# Altium schematic symbol library Headers.SchLib: 126 symbols (part 1 of 2)
Pins are listed as number, name and electrical type; pins without a type are passive.

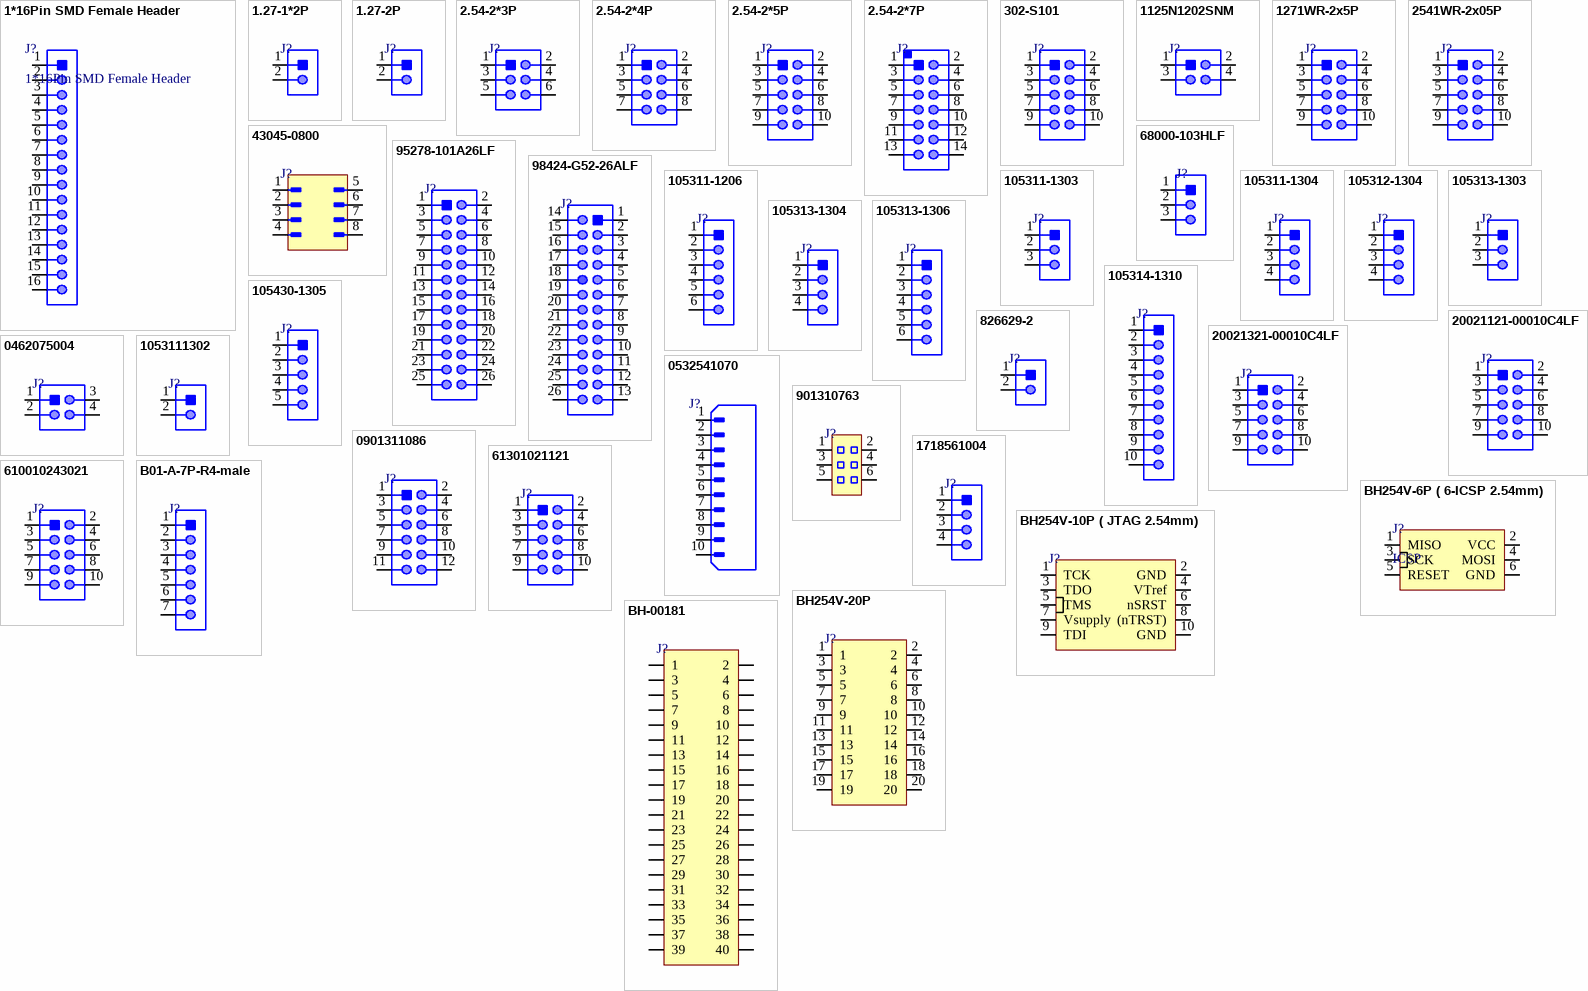
[diagram p0: symbols 1*16Pin SMD Female Header to BH-00181]

## 1*16Pin SMD Female Header
designator J?
Manufacturer: E-SIMPO; Manufacturer Part no:: SMT female header; Package: SMD; Item Type: Header; ComponentLink1Description: Aliexpress; ComponentLink1URL: https://aliexpress.us/item/2255800743267642.html?spm=a2g0o.detail.1000023.4.310a8hpZ8hpZEX&gatewayAdapt=glo2usa4itemAdapt
footprint 1*16Pin SMD Female Header
pins: 1, 2, 3, 4, 5, 6, 7, 8, 9, 10, 11, 12, 13, 14, 15, 16

## 1.27-1*2P
designator J?
3A Direct Insert Policy 1.7mm 2P 3mm -55℃~+105℃ 2.5mm 1.27mm Single Row Black Brass 1x2P Plugin,P=1.27mm Pin Headers ROHS; Manufacturer: BOOMELE(BOOM Precision Elec); Manufacturer Part Number: 1.27-1*2P; Item Type: Male; Package: Plugin,P=1.27mm; LCSC Part Number: C703015; ComponentLink1Description: LCSC; ComponentLink1URL: https://www.lcsc.com/product-detail/Pin-Headers_BOOMELE-Boom-Precision-Elec-1-27-1-2P_C703015.html
footprint HDR 1x2 Male 1.27mm
pins: 1, 2

## 1.27-2P
designator J?
250V 1A Right-Angle Square Pins 2P -25℃~+85℃ 1.27mm Plugin Black 1x2P Push-Pull,P=1.27mm Pin Headers ROHS; Manufacturer: BOOMELE; Manufacturer Part Number: 1.27-2P; Package: Push-Pull,P=1.27mm; LCSC Part Number: C48999; Item Type: Headers; ComponentLink1Description: LCSC; ComponentLink1URL: https://jlcpcb.com/partdetail/boomele_boom_Precision_elec-1_272P/C48999
footprint HDR1X2 (R/A Male) 1.27mm Pitch
pins: 1, 2

## 2.54-2*3P
designator J?
Straight 6P 2.54mm 双排 Black Plugin,P=2.54mm Pin Headers ROHS; Manufacturer: BOOMELE(BOOM Precision Elec); Manufacturer Part Number: 2.54-2*3P; Item Type: Male; Package: SMD,P=2.54mm; LCSC Part Number: C65114; ComponentLink1Description: LCSC; ComponentLink1URL: https://www.lcsc.com/product-detail/Pin-Headers_BOOMELE-Boom-Precision-Elec-2-54-2-3P_C65114.html
footprint 2.54-2*3P
pins: 1, 2, 3, 4, 5, 6

## 2.54-2*4P
designator J?
3A Brick nogging Square Pins 2.5mm 8P 6mm -55℃~+105℃ 2.54mm 双排 Black 2x4P 2.54mm SMD,P=2.54mm Pin Headers ROHS; Manufacturer: BOOMELE(BOOM Precision Elec); Manufacturer Part Number: 2.54-2*4P; Item Type: Male; Package: SMD,P=2.54mm; LCSC Part Number: C192300; ComponentLink1Description: LCSC; ComponentLink1URL: https://www.lcsc.com/product-detail/Pin-Headers_BOOMELE-Boom-Precision-Elec-C192300_C192300.html
footprint C192300
pins: 1, 2, 3, 4, 5, 6, 7, 8

## 2.54-2*5P
designator J?
2.54mm 2.54mm 双排 Gold 2.5A 10P Brass -55℃~+105℃ 220℃@10S Brick nogging 2x5P 8.5mm Top Square Holes SMD,P=2.54mm Female Headers ROHS; Manufacturer: BOOMELE(BOOM Precision Elec); Manufacturer Part Number: 2.54-2*5P; Item Type: Male; Package: SMD,P=2.54mm; LCSC Part Number: C843271; ComponentLink1Description: LCSC; ComponentLink1URL: https://www.lcsc.com/product-detail/Female-Headers_BOOMELE-Boom-Precision-Elec-2-54-2-5P_C843271.html
footprint C843271
pins: 1, 2, 3, 4, 5, 6, 7, 8, 9, 10

## 2.54-2*7P
designator J?
2.54mm Straight 2x7P 7 Horn buckle 2.54mm 2 Plugin,P=2.54mm IDC Connectors ROHS; Manufacturer: BOOMELE; Manufacturer Part Number: 2.54-2*7P; Package: Plugin,P=2.54mm; LCSC Part Number: C9037; Item Type: IDC Connectors; ComponentLink1Description: LCSC; ComponentLink1URL: https://www.lcsc.com/product-detail/IDC-Connectors_BOOMELE-Boom-Precision-Elec-2-54-2-7P_C9037.html
footprint 2.54-2*7P
pins: 1, 2, 3, 4, 5, 6, 7, 8, 9, 10, 11, 12, 13, 14

## 302-S101
designator J?
CONN HEADER VERT 10POS 2.54MM; Manufacturer: On-Shore Technology; Manufacturer Part Number: 302-S101; Number of Positions: 10; Connector Type: Male Pin; Pitch: 0.1inch; Item Type: Shrouded Header; Supplier 1: Digi-Key; Stock 1: 23093; Pricing 1: 1=0.28, 10=0.265, 100=0.1856, 500=0.15908, 1000=0.13256, 5000=0.11362, 10000=0.10605 (USD); Mount: Through Hole; Color: Black; Contact Plating: Gold; Number of Rows: 2; Packaging: Tray; Termination: Solder; Series: 302; Contact Type: Male Pin; Row Spacing: 0.1inch; ComponentLink1URL: http://www.on-shore.com/wp-content/uploads/2018/04/302-SXX1.pdf?src-supplier=Digi-Key; ComponentLink1Description: http://www.on-shore.com/wp-content/uploads/2018/04/302-SXX1.pdf?src-supplier=Digi-Key; Supplier Part Number 1: ED1543-ND
footprint 302-S101_
pins: 1, 2, 3, 4, 5, 6, 7, 8, 9, 10

## 1125N1202SNM
designator J?
CONN HEADER 4 POS 2.54mm SMD; Manufacturer: RTLECS; Manufacturer Part Number: 1125N1202SNM; Connector type: Pin header Male SMT; Pitch: 2.54; Current rating: 3 A; Item Type: Header; ComponentLink1Description: LCSC; ComponentLink1URL: https://m.id.aliexpress.com/i/32727363517.html
footprint 1125N1202SNM. (CONN HEADER 4 POS 2.54mm SMD)
pins: 1, 2, 3, 4

## 1271WR-2x5P
designator J?
Gold Right-Angle Square Pins 2mm 3mm 10P -40℃~+105℃ 1.27mm Double row 2x5P Push-Pull,P=1.27mm Pin Headers ROHS; Manufacturer: HanElectricity; Manufacturer Part Number: 1271WR-2x5P; Item Type: Header; Package: Push-Pull,P=1.27mm; LCSC Part Number: C7470108; ComponentLink1Description: LCSC; ComponentLink1URL: https://jlcpcb.com/partdetail/Hanelectricity-1271WR2x5P/C7470108
footprint HDR 2x5TH (rigth angle) 1.27mm Pitch
pins: 1, 2, 3, 4, 5, 6, 7, 8, 9, 10

## 2541WR-2x05P
designator J?
Right-Angle 2.5mm 6mm 10P 2.54mm 双排 2x5P Plugin,P=2.54mm Pin Headers ROHS; Manufacturer: HanElectricity; Manufacturer Part Number: 2541WR-2x05P; Package: Plugin,P=2.54mm; LCSC Part Number: C5383090; Item Type: Pin Header; ComponentLink1Description: LCSC; ComponentLink1URL: https://www.lcsc.com/product-detail/Pin-Headers_HanElectricity-2541WR-2x05P_C5383090.html
footprint HDR 2x5TH (rigth angle)
pins: 1, 2, 3, 4, 5, 6, 7, 8, 9, 10

## 43045-0800
designator J?
CONN HEADER R/A 8POS 3MM; Manufacturer: Molex; Manufacturer Part Number: 43045-0800; Item Type: Headers and Wire Housings; Plating: Tin; Contact Resistance: 10mR; Max Voltage Rating (DC): 250.25kV; Current Rating: 5A; Number of Poles: 8; Voltage Rating (AC): 250V; Voltage Rating: 600V; Gender: Male; Approvals: UL,CSA,TUV; Glow Wire Compliant: Compliant; Supplier: Arrow Electronics; Supplier Part Number: 43045-0800; RoHS: Yes; Stock: 99682; Pricing: 1=0.8079, 10=0.7846, 100=0.7589, 500=0.7388, 1440=0.7241, 5760=0.7046 (USD); Mounting Technology: Through Hole; Case/Package: SMC; Contact Plating: Tin; Contact Material: Brass,Tin; Color: Black; Material: Polyester; Housing Color: Black; Housing Material: Thermoplastic; Min Operating Temperature: -40°C; Max Operating Temperature: 105°C; Number of Rows: 2; Package Quantity: 1440; Packaging: Tray; Max Current Rating: 5A; Number of Positions: 8; Termination: Solder; Number of Contacts: 8; Number of Circuits: 8; Working Voltage: 250V; Orientation: Right Angle; Voltage Rating (DC): 250V; Series: 43045; Diameter: 3mm; Length: 16.15mm; Height: 8.77mm; Pitch: 3mm; Row Spacing: 3mm; Depth: 12.2mm; Radiation Hardening: No; Halogen Free: Low Halogen; Lead Free: Lead Free; Flammability Rating: UL94 V-0; RoHS Compliant: Yes; Reach SVHC Compliant: Unknown; ComponentLink1URL: https://datasheet.ciiva.com/11751/0900766b80027348-11751142.pdf?src-supplier=Rs; ComponentLink1Description: https://datasheet.ciiva.com/11751/0900766b80027348-11751142.pdf?src-supplier=Rs; ComponentLink2URL: https://datasheet.ciiva.com/14155/04402310-14155206.pdf?src-supplier=Distrelec; ComponentLink2Description: https://datasheet.ciiva.com/14155/04402310-14155206.pdf?src-supplier=Distrelec; ComponentLink3URL: https://datasheet.ciiva.com/1443/1850016-1443537.pdf?src-supplier=Element14; ComponentLink3Description: https://datasheet.ciiva.com/1443/1850016-1443537.pdf?src-supplier=Element14
footprint 0430450800
pins: 1, 2, 3, 4, 5, 6, 7, 8

## 68000-103HLF
designator J?
CONN HEADER VERT 3POS 2.54MM; Manufacturer Part Number: 68000-103HLF; Item Type: Male Header; Number of Positions: 3; Current Rating: 3A; Insulation Resistance: 5GR; Voltage Rating: 1.5kV; Contact Post Length: 2.41mm; LCSC Part Number: C168677; Supplier: Avnet; Supplier Part Number: 88K1775; RoHS: No; Category: Headers and Wire Housings; Stock: 2805; Pricing: 1=0.395, 10=0.31, 25=0.29, 50=0.27, 100=0.25 (USD); Contact Plating: Gold,GXT; Contact Material: Bronze; Housing Material: Thermoplastic; Housing Color: Black; Min Operating Temperature: -65°C; Max Operating Temperature: 125°C; Number of Rows: 1; Termination: Through Hole; Packaging: Bulk; Number of Contacts: 3; Contact Gender: Male; Orientation: Straight; Max Voltage Rating (AC): 1.5kV; Package Quantity: 100; Series: 68000; Length: 7.62mm; Pitch: 2.54mm; Contact Mating Length: 5.84mm; Depth: 2.41mm; Radiation Hardening: No; Flammability Rating: UL94 V-0; Reach SVHC Compliant: No; ComponentLink2URL: https://datasheet.ciiva.com/46392/1914865-46392021.pdf?src-supplier=Element14; ComponentLink2Description: https://datasheet.ciiva.com/46392/1914865-46392021.pdf?src-supplier=Element14
footprint HDR1X3_ (Connector; Header; 3 Position)
pins: 1, 2, 3

## 95278-101A26LF
designator J?
CONN HEADER SMD 26POS 2.54MM; Manufacturer: Amphenol ICC (FCI); Manufacturer Part Number: 95278-101A26LF; Item Type: Male Header; Package: Custom; ComponentLink1Description: New link; ComponentLink1URL: https://www.digikey.com/en/products/detail/amphenol-icc-fci/95278-101A26LF/1488594; LCSC Part Number: C60131
footprint 95278-101A26LF. (CONN HEADER SMD 26POS 2.54MM)
pins: 1, 2, 3, 4, 5, 6, 7, 8, 9, 10, 11, 12, 13, 14, 15, 16, 17, 18, 19, 20, 21, 22, 23, 24, 25, 26

## 98424-G52-26ALF
designator J?
CONN HEADER SMD 26POS 2MM; Manufacturer: Amphenol ICC / FCI; Manufacturer Part Number: 98424-G52-26ALF; Item Type: Headers and Wire Housings; Supplier: Avnet; Supplier Part Number: 65AC3204; RoHS: Yes; Stock: 29; Pricing: 1=1.91 (USD); ComponentLink1URL: https://datasheet.ciiva.com/713/98424-713391.pdf?src-supplier=Digikey; ComponentLink1Description: https://datasheet.ciiva.com/713/98424-713391.pdf?src-supplier=Digikey; ComponentLink2URL: https://datasheet.ciiva.com/713/98424-713392.pdf?src-supplier=Digikey; ComponentLink2Description: https://datasheet.ciiva.com/713/98424-713392.pdf?src-supplier=Digikey; ComponentLink3URL: https://datasheet.ciiva.com/9473/98424-9473029.pdf?src-supplier=Avnet; ComponentLink3Description: https://datasheet.ciiva.com/9473/98424-9473029.pdf?src-supplier=Avnet; ComponentLink4URL: https://datasheet.ciiva.com/729/98424-729327.pdf?src-supplier=Digikey; ComponentLink4Description: https://datasheet.ciiva.com/729/98424-729327.pdf?src-supplier=Digikey; LCSC Part Number: C213188
footprint 98424-G52-26ALF
pins: 1, 2, 3, 4, 5, 6, 7, 8, 9, 10, 11, 12, 13, 14, 15, 16, 17, 18, 19, 20, 21, 22, 23, 24, 25, 26

## 105311-1206
designator J?
CONN HEADER VERT 6POS 2.5MM; Manufacturer: Molex; Manufacturer Part Number: 105311-1206; Supplier: Mouser; Supplier Part Number: 538-105311-1206; RoHS: No; Item Type: Header; Stock: 291; Pricing: 1=2.1, 10=1.48, 50=1.48, 100=1.48, 1000=1.17, 10000=1.17 (USD); ComponentLink1URL: https://www.molex.com/pdm_docs/sd/1053111102_sd.pdf?src-supplier=Digikey; ComponentLink1Description: https://www.molex.com/pdm_docs/sd/1053111102_sd.pdf?src-supplier=Digikey
footprint 1053111206
pins: 1, 2, 3, 4, 5, 6

## 105311-1303
designator J?
CONN HEADER VERT 3POS 2.5MM; Manufacturer: Molex; Manufacturer Part Number: 105311-1303; Number of Positions: 3; Voltage Rating: 250V; Supplier: Mouser; Supplier Part Number: 538-105311-1303; RoHS: No; Item Type: Header; Stock: 668; Pricing: 1=1.61, 10=1.35, 50=1.35, 100=1.12, 1000=0.918, 10000=0.796 (USD); Mounting Technology: Through Hole; Contact Material: Brass; Contact Shape: Square; Insulation Material: Polymer; Insulation Color: Black; Contact Finish - Mating: GOLD; Min Operating Temperature: -40°C; Max Operating Temperature: 105°C; Number of Rows: 1; Connector Type: Header; Fastening Type: Latch; Packaging: Tray; Termination: Solder; Series: Nano-Fit 105311; Contact Type: Male Pin; ComponentLink1URL: https://www.molex.com/pdm_docs/sd/1053111102_sd.pdf?src-supplier=Digikey; ComponentLink1Description: https://www.molex.com/pdm_docs/sd/1053111102_sd.pdf?src-supplier=Digikey
footprint 1053111303
pins: 1, 2, 3

## 105311-1304
designator J?
CONN HEADER VERT 4POS 2.5MM; Manufacturer: Molex; Manufacturer Part Number: 105311-1304; Supplier 1: Digikey; RoHS: No; Item Type: Header; Stock 1: 2407; Pricing 1: 1=1.89, 10=1.612, 126=1.33143, 1008=1.05111, 4914=0.93198, 10080=0.91096 (USD); ComponentLink1URL: https://www.molex.com/pdm_docs/sd/1053111102_sd.pdf?src-supplier=Digikey; ComponentLink1Description: https://www.molex.com/pdm_docs/sd/1053111102_sd.pdf?src-supplier=Digikey; Supplier Part Number 1: WM15091-ND; LCSC Part Number: C17483525
footprint 1053111304
pins: 1, 2, 3, 4

## 105312-1304
designator J?
CONN HEADER VERT 4POS 2.5MM; Manufacturer: Molex; Manufacturer Part Number: 105312-1304; Supplier: Mouser; Supplier Part Number: 538-105312-1304; RoHS: No; Item Type: Header; Stock: 2910; Pricing: 1=1.24, 10=1.06, 50=1.06, 100=0.921, 1000=0.865, 10000=0.865 (USD); ComponentLink1URL: https://www.molex.com/pdm_docs/sd/1053121204_sd.pdf?src-supplier=Digikey; ComponentLink1Description: https://www.molex.com/pdm_docs/sd/1053121204_sd.pdf?src-supplier=Digikey
footprint 105312-1304
pins: 1, 2, 3, 4

## 105313-1303
designator J?
CONN HEADER R/A 3POS 2.5MM; Manufacturer: Molex; Manufacturer Part Number: 105313-1303; Number of Positions: 3; Voltage Rating: 250V; Supplier: Mouser; Supplier Part Number: 538-105313-1303; RoHS: Yes; Item Type: Header; Stock: 1725; Pricing: 1=1.27, 10=1.08, 50=1.08, 100=0.945, 1000=0.945, 10000=0.945 (USD); Mounting Technology: Through Hole; Contact Material: Brass; Contact Shape: Square; Insulation Material: Polymer; Insulation Color: Black; Contact Finish - Mating: GOLD; Min Operating Temperature: -40°C; Max Operating Temperature: 105°C; Number of Rows: 1; Connector Type: Header; Fastening Type: Latch; Packaging: Tray; Termination: Solder; Series: Nano-Fit 105313; Contact Type: Male Pin; RoHS Compliant: Yes; ComponentLink1URL: https://www.molex.com/pdm_docs/sd/1053131102_sd.pdf?src-supplier=Digikey; ComponentLink1Description: https://www.molex.com/pdm_docs/sd/1053131102_sd.pdf?src-supplier=Digikey
footprint 1053131303
pins: 1, 2, 3

## 105313-1304
designator J?
CONN HEADER R/A 4POS 2.5MM; Manufacturer: Molex; Manufacturer Part Number: 105313-1304; Plating: 154ConductorMaterial; Number of Positions: 4; Voltage Rating: 250V; Current Rating: 8A; Number of Circuits: 4NUMBER; Supplier: Mouser; Supplier Part Number: 538-105313-1304; RoHS: Yes; Item Type: Header; Stock: 4079; Pricing: 1=1.61, 10=1.45, 50=1.45, 100=1.26, 1000=1.11, 10000=1.11 (USD); Mounting Technology: Through Hole; Contact Material: Brass; Contact Shape: Square; Insulation Material: Polymer; Insulation Color: Black; Contact Finish - Mating: GOLD; Min Operating Temperature: -40°C; Max Operating Temperature: 105°C; Connector Type: Header; Fastening Type: Latch; Packaging: Tray; Number of Rows: 1; Termination: Solder; Series: Nano-Fit 105313; Contact Type: Male Pin; Number of Contacts: 4NUMBER; Orientation: 5492OrientationType; Height: 6.84mm; RoHS Compliant: Yes; ComponentLink1URL: http://www.farnell.com/datasheets/2788568.pdf?src-supplier=Farnell; ComponentLink1Description: http://www.farnell.com/datasheets/2788568.pdf?src-supplier=Farnell; ComponentLink2URL: http://www.farnell.com/datasheets/2788568.pdf?src-supplier=Newark; ComponentLink2Description: http://www.farnell.com/datasheets/2788568.pdf?src-supplier=Newark; ComponentLink3URL: https://www.molex.com/pdm_docs/sd/1053131102_sd.pdf?src-supplier=Digikey; ComponentLink3Description: https://www.molex.com/pdm_docs/sd/1053131102_sd.pdf?src-supplier=Digikey
footprint 1053131304
pins: 1, 2, 3, 4

## 105313-1306
designator J?
CONN HEADER R/A 6POS 2.5MM; Manufacturer: Molex; Manufacturer Part Number: 105313-1306; Supplier: Mouser; Supplier Part Number: 538-105313-1306; RoHS: Yes; Item Type: Header; Stock: 1427; Pricing: 1=2.09, 10=1.9, 50=1.9, 100=1.65, 1000=1.48, 10000=1.39 (USD); ComponentLink1URL: https://www.molex.com/pdm_docs/sd/1053131102_sd.pdf?src-supplier=Digikey; ComponentLink1Description: https://www.molex.com/pdm_docs/sd/1053131102_sd.pdf?src-supplier=Digikey
footprint 1053131306
pins: 1, 2, 3, 4, 5, 6

## 105314-1310
designator J?
CONN HEADER R/A 10POS 2.5MM; Manufacturer: Molex; Manufacturer Part Number: 105314-1310; Item Type: Headers; Number of Positions: 10; Supplier: Mouser; Supplier Part Number: 538-105314-1310; RoHS: Yes; Stock: 1648; Pricing: 1=2.66, 10=2.31, 50=2.31, 100=2.15, 1000=2.15, 10000=1.95 (USD); Mounting Technology: Through Hole; Contact Material: Brass; Contact Shape: Square; Insulation Material: Polymer; Insulation Color: Black; Contact Finish - Mating: GOLD; Min Operating Temperature: -40°C; Max Operating Temperature: 105°C; Connector Type: Header; Fastening Type: Latch; Packaging: Tray; Number of Rows: 2; Termination: Solder; Series: Nano-Fit 105314; Contact Type: Male Pin; RoHS Compliant: Yes; ComponentLink1URL: https://www.molex.com/pdm_docs/sd/1053141104_sd.pdf?src-supplier=Digikey; ComponentLink1Description: https://www.molex.com/pdm_docs/sd/1053141104_sd.pdf?src-supplier=Digikey; ComponentLink2URL: http://www.farnell.com/datasheets/2788570.pdf?src-supplier=Newark; ComponentLink2Description: http://www.farnell.com/datasheets/2788570.pdf?src-supplier=Newark
footprint 1053141310
pins: 1, 2, 3, 4, 5, 6, 7, 8, 9, 10

## 105430-1305
designator J?
NANO-FIT HDR SMT RA SGL 5CKT 30A; Manufacturer: Molex; Manufacturer Part Number: 105430-1305; Item Type: Header; Supplier: Mouser; Supplier Part Number: 538-105430-1305; RoHS: No; Stock: 818; Pricing: 1=3.62, 10=3.19, 50=3.19, 100=2.54, 1000=2.19, 10000=2.15 (USD)
footprint 1054301305
pins: 1, 2, 3, 4, 5

## 826629-2
designator J?
CONN HEADER VERT 2POS 2.54MM; Manufacturer: TE Connectivity; Manufacturer Part Number: 8266292; Number of Contacts: 2; Connector Type: Plug,Header,Pin; Current Rating: 3A; Board Standoff: No (Without); High Speed Serial Data Connector: No; PCB Mount Retention: Without; Gender: Male; PCB Mounting Orientation: Vertical; Contact Post Length: 0.1259inch; Plating Thickness: 0.8um; Item Type: Male Header; Supplier 1: RSComponents; RoHS: Yes; Category: Board to Board Connectors; Mount: Straddle Mount; Contact Plating: Gold,Tin; Contact Material: Bronze; Color: Green; Housing Color: Green; Housing Material: PBT; Contact Shape: Square; Min Operating Temperature: -65°C; Max Operating Temperature: 105°C; Number of Rows: 1; Termination: Through Hole; Number of Positions: 2; Packaging: Carton; Package Quantity: 3000; Series: AMPMODU MOD II; Contact Type: Male Pin; Contact Gender: Male; Orientation: Straight; Contact Protection: No (Without); Gasket: No (Without); High Temperature Housing: No; Keyed: No; Mating Alignment: No (Without); Mating Connector Lock: No (Without); Selectively Loaded: No (Without); Stabilizers: No (Without); Strain Relief: No (Without); Length: 5.08mm; Pitch: 2.54mm; Contact Mating Length: 6.7mm; Row Spacing: 2.54mm; Depth: 2.5mm; Radiation Hardening: No; Flammability Rating: UL94 V-0; REACH SVHC: No SVHC; ELV: Compliant; Lead Free: Lead Free; ComponentLink1URL: https://datasheet.ciiva.com/11746/0900766b80d7c358-11746248.pdf?src-supplier=RSComponents; ComponentLink1Description: https://datasheet.ciiva.com/11746/0900766b80d7c358-11746248.pdf?src-supplier=RSComponents; ComponentLink2URL: https://datasheet.ciiva.com/30224/8266292-30224019.pdf?src-supplier=Onlinecomponents.com; ComponentLink2Description: https://datasheet.ciiva.com/30224/8266292-30224019.pdf?src-supplier=Onlinecomponents.com; ComponentLink3URL: https://datasheet.ciiva.com/29369/001094754-da-01-en-stiftleiste-1-reihig-0-0826629-2-29369600.pdf?src-supplier=Conrad; ComponentLink3Description: https://datasheet.ciiva.com/29369/001094754-da-01-en-stiftleiste-1-reihig-0-0826629-2-29369600.pdf?src-supplier=Conrad; ComponentLink4URL: https://datasheet.ciiva.com/6857/eng-cd-826629-aa-basefilename-6857135.pdf?src-supplier=Digi-Key; ComponentLink4Description: https://datasheet.ciiva.com/6857/eng-cd-826629-aa-basefilename-6857135.pdf?src-supplier=Digi-Key; ComponentLink5URL: https://datasheet.ciiva.com/14120/eh826629-draw-14120837.pdf?src-supplier=Distrelec; ComponentLink5Description: https://datasheet.ciiva.com/14120/eh826629-draw-14120837.pdf?src-supplier=Distrelec; Supplier Part Number 1: 1361864; LCSC Part Number: C86471
footprint HDR1X2_ (CONN HEADER VERT 2POS 2.54MM)
pins: 1, 2

## 20021121-00010C4LF
designator J?
CONN HEADER SMD 10POS 1.27MM; Manufacturer: Amphenol FCI; Manufacturer Part Number: 20021121-00010C4LF; Number of Contacts: 10; Contact Resistance: 30mR; Current Rating: 1A; Voltage Rating: 125V; Insulation Resistance: 100MR; Gender: Male; Connector Type: Male Pin,Header; Row Spacing: 0.05inch; Stack Height: 3mm; Item Type: Jtag Male Header; Supplier 1: Digi-Key; Stock 1: 0; Pricing 1: 1=0.87, 10=0.761, 100=0.6563 (USD); Mount: Surface Mount; Contact Plating: Gold; Contact Material: Copper Alloy,Copper,Gold; Color: Black; Housing Color: Black; Housing Material: Thermoplastic; Min Operating Temperature: -40°C; Max Operating Temperature: 85°C; Number of Rows: 2; Termination: Solder; Packaging: Tape and Reel; Package Quantity: 600; Number of Positions: 10; Max Voltage Rating (AC): 125V; Orientation: Straight; Length: 6.35mm; Pitch: 1.27mm; Contact Mating Length: 0.12inch; Depth: 3.4mm; Radiation Hardening: No; REACH SVHC: No SVHC; ComponentLink1URL: https://www.verical.com/server-webapp/html/getDatasheet?partID=177140&src-supplier=Verical; ComponentLink1Description: https://www.verical.com/server-webapp/html/getDatasheet?partID=177140&src-supplier=Verical; ComponentLink2URL: http://portal.fciconnect.com/Comergent/fci/drawing/20021121.pdf?src-supplier=Avnet; ComponentLink2Description: http://portal.fciconnect.com/Comergent/fci/drawing/20021121.pdf?src-supplier=Avnet; ComponentLink3URL: https://cdn.amphenol-icc.com/media/wysiwyg/files/drawing/20021121.pdf?src-supplier=Digi-Key; ComponentLink3Description: https://cdn.amphenol-icc.com/media/wysiwyg/files/drawing/20021121.pdf?src-supplier=Digi-Key; ComponentLink4URL: http://portal.fciconnect.com/Comergent/fci/drawing/20021121.pdf?src-supplier=Avnet+Europe; ComponentLink4Description: http://portal.fciconnect.com/Comergent/fci/drawing/20021121.pdf?src-supplier=Avnet+Europe; ComponentLink5URL: https://media.digikey.com/pdf/Data%20Sheets/FCI%20PDFs/Minitek%20127_Catalog.pdf?src-supplier=Digi-Key; ComponentLink5Description: https://media.digikey.com/pdf/Data%20Sheets/FCI%20PDFs/Minitek%20127_Catalog.pdf?src-supplier=Digi-Key; ComponentLink6URL: http://portal.fciconnect.com/Comergent//fci/drawing/20021121.pdf?src-supplier=Mouser; ComponentLink6Description: http://portal.fciconnect.com/Comergent//fci/drawing/20021121.pdf?src-supplier=Mouser; Supplier Part Number 1: 609-3695-6-ND; LCSC Part Number: C150517
footprint 20021121-00010C4LF_
pins: 1, 2, 3, 4, 5, 6, 7, 8, 9, 10

## 20021321-00010C4LF
designator J?
CONN RCPT 10POS 0.05 GOLD SMD; Manufacturer: Amphenol Communications Solutions; Manufacturer Part Number: 20021321-00010C4LF; Item Type: Headers and Wire Housings; Gender: 4472Gender; Connector Type: 4640ConnectorType; Current Rating: 1A; Number of Contacts: 10NUMBER; Voltage Rating: 125V; Contact Resistance: 30mR; Insulation Resistance: 100MR; Pitch: 1.27mm; Stack Height: 4.3mm; Supplier: Digikey; LCSC Part Number: C598542; RoHS: No; Stock: 9747; Pricing: 1=1.13, 10=0.963, 100=0.8184 (USD); Mounting Technology: 8Mount; Pins: 10NUMBER; Color: 46Colour; Contact Material: 153,157ConductorMaterial; Contact Plating: 157ConductorMaterial; Housing Color: 46Colour; Housing Material: 4896ConductorMaterial; Min Operating Temperature: -55°C; Max Operating Temperature: 125°C; Number of Positions: 10NUMBER; Number of Rows: 2NUMBER; Packaging: 10Packaging; Termination: 4558ConnectorType; Max Voltage Rating (AC): 125V; Length: 13.16mm; Height: 4.75mm; Depth: 3mm; Row Spacing: 1.27mm; Lead Free: 5697LeadFree; Reach SVHC Compliant: 4186SVHC; ComponentLink1URL: https://datasheet.octopart.com/20021321-00010C4LF-FCI-datasheet-27119701.pdf?src-supplier=Newark; ComponentLink1Description: https://datasheet.octopart.com/20021321-00010C4LF-FCI-datasheet-27119701.pdf?src-supplier=Newark; ComponentLink2URL: https://datasheet.octopart.com/20021321-00010C4LF-Amphenol-Communications-Solutions-datasheet-98396828.pdf?src-supplier=Element14; ComponentLink2Description: https://datasheet.octopart.com/20021321-00010C4LF-Amphenol-Communications-Solutions-datasheet-98396828.pdf?src-supplier=Element14; ComponentLink3URL: https://datasheet.octopart.com/20021321-00010C4LF-FCI-datasheet-21379677.pdf?src-supplier=Farnell; ComponentLink3Description: https://datasheet.octopart.com/20021321-00010C4LF-FCI-datasheet-21379677.pdf?src-supplier=Farnell; ComponentLink4URL: https://datasheet.octopart.com/20021321-00010C4LF-Amphenol-Communications-Solutions-datasheet-100449241.pdf?src-supplier=TME; ComponentLink4Description: https://datasheet.octopart.com/20021321-00010C4LF-Amphenol-Communications-Solutions-datasheet-100449241.pdf?src-supplier=TME
footprint 20021321-00010C4LF
pins: 1, 2, 3, 4, 5, 6, 7, 8, 9, 10

## 0462075004
designator J?
MINI-FIT JR LCP VERT. HDR PEGS 4; Manufacturer: Molex; Manufacturer Part Number: 0462075004; Item Type: Header; Supplier: Digikey; Supplier Part Number: 900-0462075004-ND; RoHS: No; Pricing: 4560=4.03702 (USD)
footprint 0462075004
pins: 1, 2, 3, 4

## 0532541070
designator J?
CONN HEADER R/A 10POS 2MM; Manufacturer: Molex; Manufacturer Part Number: 53254-1070; Item Type: Headers and Wire Housings; Plating: Tin; Voltage Rating: 125V; Current Rating: 2A; Number of Positions: 10; Gender: Male; Number of Circuits: 9; Glow Wire Compliant: Non-compliant; Supplier: Arrow Electronics; Supplier Part Number: 53254-1070; RoHS: Yes; Stock: 4800; Pricing: 4800=0.2383, 6000=0.2327, 10000=0.2292, 20000=0.2263, 30000=0.2219, 50000=0.2176, 100000=0.2136 (USD); Mounting Technology: Through Hole; Contact Plating: Tin; Contact Material: Brass; Housing Material: Nylon; Min Operating Temperature: -40°C; Max Operating Temperature: 105°C; Number of Rows: 1; Packaging: Tray; Contact Gender: Male; Termination: Through Hole; Number of Contacts: 10; Orientation: Right Angle; Series: 53254; Pitch: 2mm; RoHS Compliant: Yes; Reach SVHC Compliant: Unknown; ComponentLink1URL: https://datasheet.ciiva.com/7810/0532541070-pcb-headers-7810534.pdf?src-supplier=Element14; ComponentLink1Description: https://datasheet.ciiva.com/7810/0532541070-pcb-headers-7810534.pdf?src-supplier=Element14
footprint 0532541070
pins: 1, 2, 3, 4, 5, 6, 7, 8, 9, 10

## 901310763
designator J?
CONN HEADER VERT 6POS 2.54MM; Manufacturer: Molex; Manufacturer Part Number: 90131-0763; Item Type: Headers and Wire Housings; Plating: Tin; Voltage Rating (AC): 350V; Number of Contacts: 6; Contact Resistance: 20mR; Current Rating: 3A; Insulation Resistance: 5GR; Gender: Male; Supplier: Mouser; LCSC Part Number: C588698; RoHS: Yes; Stock: 5067; Pricing: 1=1.26, 10=0.992, 50=0.992, 100=0.947, 1000=0.855, 10000=0.827 (USD); Mounting Technology: Through Hole; Contact Plating: Gold,Tin; Contact Material: Brass; Material: Glass,Polyester; Housing Color: Black; Housing Material: Polyester; Min Operating Temperature: -55°C; Max Operating Temperature: 125°C; Termination: Through Hole; Number of Rows: 2; Voltage Rating: 350V; Packaging: Tray; Package Quantity: 2400; Series: C-Grid III; Voltage Rating (DC): 350V; Number of Poles: 6; Number of Positions: 6; Working Voltage: 350V; Orientation: Straight; Number of Circuits: 6; Pitch: 2.54mm; Lead Pitch: 2.54mm; Radiation Hardening: No; Lead Free: Lead Free; RoHS Compliant: Yes; Reach SVHC Compliant: Unknown; ComponentLink1URL: https://datasheet.ciiva.com/11746/0900766b81280103-11746132.pdf?src-supplier=Rs; ComponentLink1Description: https://datasheet.ciiva.com/11746/0900766b81280103-11746132.pdf?src-supplier=Rs; ComponentLink2URL: https://datasheet.ciiva.com/5156/0901310763-pcb-headers-151716-5156767.pdf?src-supplier=Mouser; ComponentLink2Description: https://datasheet.ciiva.com/5156/0901310763-pcb-headers-151716-5156767.pdf?src-supplier=Mouser
footprint 2.54-2*3P
pins: 1, 2, 3, 4, 5, 6

## 0901311086
designator J?
2.54mm Pitch C-Grid III Header, Dual Row, Vertical, 12 Circuits, 0.10µm Gold (Au) Selective Plating; Manufacturer: Molex; Manufacturer Part Number: 0901311086; Number of Positions: 12; Pitch: 0.1inch; Item Type: Header; Supplier: Digikey; Supplier Part Number: WM20588-ND; RoHS: Yes; Category: Uncategorized; Stock: 1766; Pricing: 1=1.44, 10=1.224, 80=1.01075, 1200=0.79795, 6000=0.70752, 10800=0.69156 (USD); Mounting Technology: Through Hole; Color: Black; Contact Plating: Gold; Contact Material: Brass; Contact Shape: Square; Contact Finish - Mating: GOLD; Insulation Material: Glass; Insulation Color: Black; Packaging: Bulk; Number of Rows: 2; Termination: Solder; Fastening Type: Pull; Series: C-Grid III™ 90131; Contact Type: Male Pin; Row Spacing: 0.1inch; Contact Mating Length: 0.266inch; RoHS Compliant: Yes; Flammability Rating: UL94 V-0; ComponentLink1URL: https://www.molex.com/pdm_docs/ps/PS-99020-0001-001.pdf?src-supplier=Digikey; ComponentLink1Description: https://www.molex.com/pdm_docs/ps/PS-99020-0001-001.pdf?src-supplier=Digikey; ComponentLink2URL: http://www.molex.com/pdm_docs/sd/901311086_sd.pdf?src-supplier=Digikey; ComponentLink2Description: http://www.molex.com/pdm_docs/sd/901311086_sd.pdf?src-supplier=Digikey
footprint HDR 2x6 Straight (2.54mm)
pins: 1, 2, 3, 4, 5, 6, 7, 8, 9, 10, 11, 12

## 1053111302
designator J?
CONN HEADER VERT 2POS 2.5MM; Manufacturer: Molex; Manufacturer Part Number: 1053111302; Item Type: Headers; Supplier: Mouser; Supplier Part Number: 538-105311-1302; RoHS: No; Stock: 711; Pricing: 1=1.41, 10=0.986, 50=0.986, 100=0.898, 1000=0.746, 10000=0.681 (USD)
footprint 1053111302
pins: 1, 2

## 1718561004
designator J?
CONN HEADER VERT 4POS 2.54MM; Manufacturer: Molex; Manufacturer Part Number: 1718561004; Supplier: Digikey; Supplier Part Number: WM10288-ND; RoHS: Yes; Item Type: Header; Pricing: 1=0.73, 10=0.617, 100=0.4796, 4000=0.34254, 8000=0.30829, 12000=0.30372 (USD); ComponentLink1URL: https://datasheet.ciiva.com/24135/1718561004-pcb-headers-295430-24135941.pdf?src-supplier=Mouser; ComponentLink1Description: https://datasheet.ciiva.com/24135/1718561004-pcb-headers-295430-24135941.pdf?src-supplier=Mouser; ComponentLink2URL: https://datasheet.ciiva.com/29151/1718560002-sd-29151999.pdf?src-supplier=Digikey; ComponentLink2Description: https://datasheet.ciiva.com/29151/1718560002-sd-29151999.pdf?src-supplier=Digikey
footprint 1718561004
pins: 1, 2, 3, 4

## 61301021121
designator J?
CONN HEADER VERT 10POS 2.54MM; Manufacturer: Wurth Elektronik; Manufacturer Part Number: 61301021121; Description: THT Vertical Pin Header WR-PHD, Pitch 2.54 mm, Dual Row, 10 pins; Item Type: Headers and Wire Housings; Connector Type: Male Pin; Contact Resistance: 20mΩ; Current Rating: 3A; Gender: Male; Insulation: Insulated; Insulation Resistance: 1GΩ; Number of Contacts: 10; Operating Supply Voltage: 250V; Supplier: DigiKey; Supplier Part Number: 732-2672-ND; RoHS: Compliant; Stock: 6292; Pricing: 1=1, 10=0.978, 50=0.9028, 100=0.8271, 250=0.75152 (USD); Color: Black; Contact Gender: Male; Contact Material: Gold; Contact Mating Length: 5.9944mm; Contact Plating: Gold; Flammability Rating: UL94 V-0; Height: 8.89mm; Housing Material: PBT; Lead Pitch: 2.54mm; Length: 12.7mm; Max Operating Temperature: 105°C; Min Operating Temperature: -40°C; Mounting Technology: Through Hole; Pins: 10; Number of Positions: 10; Number of Rows: 2; Orientation: Vertical; Packaging: Bulk; Pitch: 2.54mm; Row Spacing: 2.54mm; Termination: Through Hole; Voltage Rating: 250V; Width: 12.7mm; ComponentLink1URL: https://datasheet.octopart.com:443/61301021121-W%C3%BCrth-Elektronik-datasheet-45185731.pdf?src-supplier=Upverter; ComponentLink1Description: https://datasheet.octopart.com:443/61301021121-W%C3%BCrth-Elektronik-datasheet-45185731.pdf?src-supplier=Upverter; ComponentLink2URL: https://datasheet.octopart.com:443/61301021121-W%C3%BCrth-Elektronik-datasheet-149524113.pdf?src-supplier=Future+Electronics; ComponentLink2Description: https://datasheet.octopart.com:443/61301021121-W%C3%BCrth-Elektronik-datasheet-149524113.pdf?src-supplier=Future+Electronics; ComponentLink3URL: https://datasheet.octopart.com:443/61301021121-W%C3%BCrth-Elektronik-Midcom-datasheet-10693404.pdf?src-supplier=element14+APAC; ComponentLink3Description: https://datasheet.octopart.com:443/61301021121-W%C3%BCrth-Elektronik-Midcom-datasheet-10693404.pdf?src-supplier=element14+APAC
footprint HDR 2x5 TH (Male)
pins: 1, 2, 3, 4, 5, 6, 7, 8, 9, 10

## 610010243021
designator J?
SMT Vertical Socket Header WR-PHD, Pitch 2.54 mm, Dual Row, 10 pins; Manufacturer: Wurth Electronics; Manufacturer Part Number: 610010243021; Item Type: Female Header; Supplier: Farnell; Supplier Part Number: 2827934; RoHS: Yes; Stock: 117; Pricing: 1=1.86, 10=1.41, 100=1.22, 250=1.12, 500=1.05, 1000=0.972 (GBP); RoHS Compliant: Yes; LCSC Part Number: C6848484
footprint 610010243021
pins: 1, 2, 3, 4, 5, 6, 7, 8, 9, 10

## B01-A-7P-R4-male
designator J?
7 Pin Blade RA Male Connector; Manufacturer: RTLECS; Manufacturer Part Number: B01-A-7P-R4-male; Item Type: Blade Connector; Package: Custom; LCSC Part Number: -; ComponentLink1Description: LCSC; ComponentLink1URL: *
footprint B01-A-7P-R4-male
pins: 1, 2, 3, 4, 5, 6, 7

## BH254V-6P ( 6-ICSP 2.54mm)
designator J?, comment ICSP
2.54mm -40℃~+105℃ Straight 3A 250V 3 Push - Pull 2.54mm 2 Plugin,P=2.54mm IDC Connectors ROHS; Manufacturer: XFCN; Manufacturer Part Number: BH254V-6P; Package: Plugin,P=2.54mm; LCSC Part Number: C492441; Item Type: Connector; ComponentLink1Description: LCSC; ComponentLink1URL: *https://www.lcsc.com/product-detail/IDC-Connectors_XFCN-BH254V-6P_C492441.html
footprint BH254V-6P
pins: 1 MISO, 2 VCC, 3 SCK, 4 MOSI, 5 RESET, 6 GND

## BH254V-10P ( JTAG 2.54mm)
designator J?
2.54mm -40℃~+105℃ Straight 3A 250V 5 Push - Pull 2.54mm 2 Plugin,P=2.54mm IDC Connectors ROHS; Manufacturer: XFCN; Manufacturer Part Number: BH254V-10P; Package: Plugin,P=2.54mm; LCSC Part Number: C492442; Item Type: Connector; ComponentLink1Description: LCSC; ComponentLink1URL: https://www.lcsc.com/product-detail/IDC-Connectors_XFCN-BH254V-10P_C492442.html
footprint BH254V-10P
pins: 1 TCK, 2 GND, 3 TDO, 4 VTref, 5 TMS, 6 nSRST, 7 Vsupply, 8 (nTRST), 9 TDI, 10 GND

## BH254V-20P
designator J?
2.54mm -40℃~+105℃ Straight 3A 2x10P 250V 10 Push - Pull 2.54mm 2 Plugin,P=2.54mm IDC Connectors ROHS; Manufacturer: XFCN; Manufacturer Part Number: BH254V-20P; Package: Plugin,P=2.54mm; LCSC Part Number: C492444; Item Type: IDC Connector; ComponentLink1Description: LCSC; ComponentLink1URL: https://www.lcsc.com/product-detail/IDC-Connectors_XFCN-BH254V-20P_C492444.html
footprint BH254V-20P
pins: 1, 2, 3, 4, 5, 6, 7, 8, 9, 10, 11, 12, 13, 14, 15, 16, 17, 18, 19, 20

## BH-00181
designator J?
2.54mm -40℃~+105℃ Brick nogging 3A 2x20P 20 Push - Pull 2.54mm 2 SMD,P=2.54mm IDC Connectors ROHS; Manufacturer: Liansheng; Manufacturer Part Number: BH-00181; Package: SMD,P=2.54mm; LCSC Part Number: C2685075; Item Type: IDC Connector; ComponentLink1Description: LCSC; ComponentLink1URL: https://www.lcsc.com/product-detail/IDC-Connectors_Liansheng-BH-00181_C2685075.html
footprint BH-00181
pins: 1, 2, 3, 4, 5, 6, 7, 8, 9, 10, 11, 12, 13, 14, 15, 16, 17, 18, 19, 20, 21, 22, 23, 24, 25, 26, 27, 28, 29, 30, 31, 32, 33, 34, 35, 36, 37, 38, 39, 40

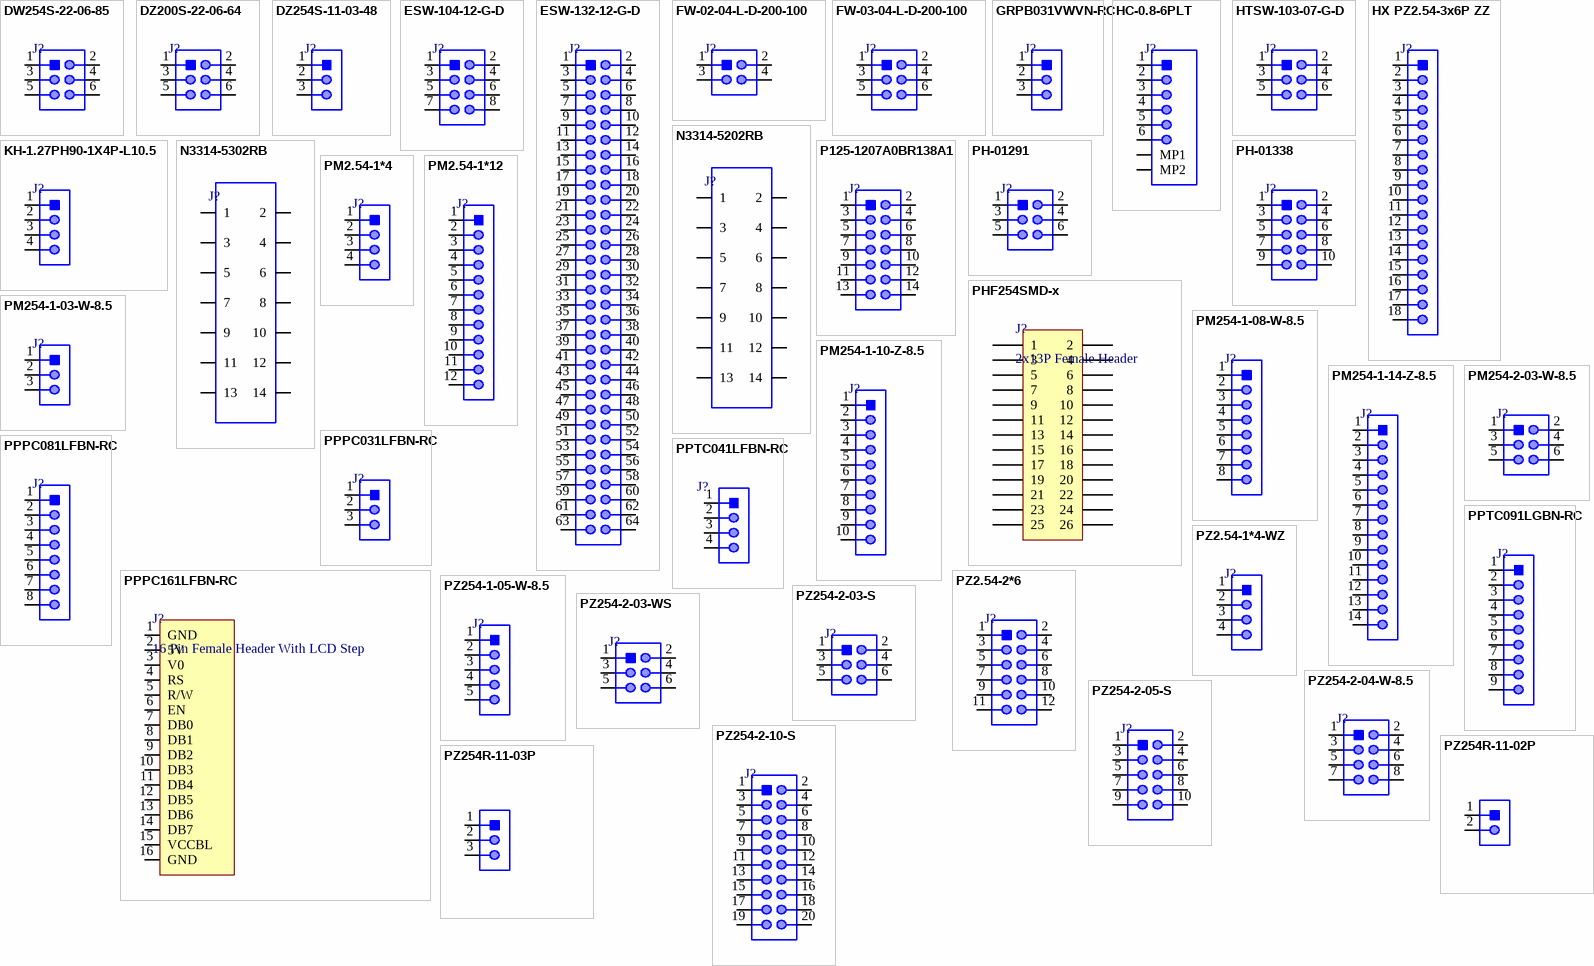
[diagram p1: symbols DW254S-22-06-85 to PZ254R-11-03P]

## DW254S-22-06-85
designator J?
2.54mm Double Row 6P Standing paste 2x3P SMD,P=2.54mm Female Headers ROHS; Manufacturer: DEALON; Manufacturer Part Number: DW254S-22-06-85; Item Type: Male Header; LCSC Part Number: C5160818; ComponentLink1Description: LCSC; ComponentLink1URL: https://www.lcsc.com/product-detail/Female-Headers_DEALON-DW254S-22-06-85_C5160818.html
footprint HDR 2x3 (Female SMD 2.54mm)
pins: 1, 2, 3, 4, 5, 6

## DZ200S-22-06-64
designator J?
Brick nogging Square Pins 6P 2mm 双排 2x3P SMD,P=2mm Pin Headers ROHS; Manufacturer: DEALON; Manufacturer Part Number: DZ200S-22-06-64; Item Type: Connector; LCSC Part Number: C5160768; Package: SMD,P=2mm; ComponentLink1Description: LCSC Link; ComponentLink1URL: https://www.lcsc.com/product-detail/Pin-Headers_DEALON-DZ200S-22-06-64_C5160768.html
footprint HDR 2x3 Male SMD(2mm Pitch)
pins: 1, 2, 3, 4, 5, 6

## DZ254S-11-03-48
designator J?
Brick nogging Square Pins 3P 2.54mm Plugin 1x3P SMD,P=2.54mm(交错脚) Pin Headers ROHS; Manufacturer: DEALON; Manufacturer Part Number: DZ254S-11-03-48; Item Type: Male Header; LCSC Part Number: C5160786; ComponentLink1Description: LCSC; ComponentLink1URL: https://www.lcsc.com/product-detail/Pin-Headers_DEALON-DZ254S-11-03-48_C5160786.html
footprint HDR1X3-SMD
pins: 1, 2, 3

## ESW-104-12-G-D
designator J?
Battery Holder Vertical; Manufacturer: Samtec; Manufacturer Part Number: ESW-104-12-G-D; Connector Type: Receptacle; Number of Positions: 8; Gender: Female; Max Current Rating: 6.9A; Max Voltage Rating (AC): 550V; Contact Resistance: 10mR; Pitch: 2.54mm; Row Spacing: 0.1inch; Item Type: Female Header; Supplier: Digikey; Supplier Part Number: SAM10466-ND; RoHS: Yes; Category: Connectors; Stock: 332; Pricing: 1=3.41, 10=3.095, 100=2.727, 500=2.31796, 1000=1.97708, 5000=1.77255 (USD); Mounting Technology: Through Hole; Contact Plating: Gold; Contact Material: Bronze; Contact Finish - Mating: GOLD; Insulation Color: Black; Insulation Material: Polymer; Contact Shape: Square; Housing Color: Black; Housing Material: Polyester; Color: Black; Min Operating Temperature: -55°C; Max Operating Temperature: 125°C; Number of Rows: 2; Packaging: Rail/Tube; Termination: Solder; Number of Contacts: 8; Series: ESW; Contact Type: Female Socket; Fastening Type: Pull; Orientation: Vertical; Package Quantity: 1; Voltage Rating (AC): 550V; Length: 10.67mm; Depth: 4.95mm; Radiation Hardening: No; RoHS Compliant: Yes; Flammability Rating: UL94 V-0; ComponentLink1URL: https://datasheet.ciiva.com/756/esw-1xx-xx-x-x-xx-xx-mkt-756054.pdf?src-supplier=Digikey; ComponentLink1Description: https://datasheet.ciiva.com/756/esw-1xx-xx-x-x-xx-xx-mkt-756054.pdf?src-supplier=Digikey; ComponentLink2URL: https://datasheet.ciiva.com/16990/nh5077-lf-16990158.pdf?src-supplier=Future+Electronics; ComponentLink2Description: https://datasheet.ciiva.com/16990/nh5077-lf-16990158.pdf?src-supplier=Future+Electronics; ComponentLink3URL: https://datasheet.ciiva.com/1391/35241-1391061.pdf?src-supplier=Element14; ComponentLink3Description: https://datasheet.ciiva.com/1391/35241-1391061.pdf?src-supplier=Element14; ComponentLink4URL: https://datasheet.ciiva.com/12342/nh5077-lf-29240-12342970.pdf?src-supplier=Mouser; ComponentLink4Description: https://datasheet.ciiva.com/12342/nh5077-lf-29240-12342970.pdf?src-supplier=Mouser
footprint HDR 2x4 Female Header
pins: 1, 2, 3, 4, 5, 6, 7, 8

## ESW-132-12-G-D
designator J?
CONN SOCKET 64POS 0.1 GOLD PCB; Manufacturer: Samtec; Manufacturer Part Number: ESW-132-12-G-D; Item Type: Connectors; Number of Contacts: 64; Gender: Receptacle; Max Current Rating: 6.9A; Contact Resistance: 10mR; Max Voltage Rating (AC): 550V; Pitch: 2.54mm; Row Spacing: 0.1inch; Supplier: Digikey; Supplier Part Number: SAM10471-ND; RoHS: Yes; Stock: 450; Pricing: 1=14.7, 10=12.736, 100=10.4968, 500=9.58712, 1000=9.228 (USD); Mounting Technology: Through Hole; Contact Plating: Gold; Contact Material: Bronze; Color: Black; Housing Color: Black; Housing Material: Polyester; Contact Finish - Mating: GOLD; Insulation Color: Black; Insulation Material: Polymer; Contact Shape: Square; Min Operating Temperature: -55°C; Max Operating Temperature: 125°C; Number of Rows: 2; Termination: Solder; Packaging: Rail/Tube; Package Quantity: 1; Connector Type: Receptacle; Number of Positions: 64; Orientation: Straight; Series: ESW; Contact Type: Female Socket; Fastening Type: Pull; Voltage Rating (AC): 550V; Length: 81.79mm; Depth: 4.95mm; RoHS Compliant: Yes; Flammability Rating: UL94 V-0; ComponentLink1URL: https://datasheet.ciiva.com/756/esw-1xx-xx-x-x-xx-xx-mkt-756084.pdf?src-supplier=Digikey; ComponentLink1Description: https://datasheet.ciiva.com/756/esw-1xx-xx-x-x-xx-xx-mkt-756084.pdf?src-supplier=Digikey
footprint ESW-132-12-G-D
pins: 1, 2, 3, 4, 5, 6, 7, 8, 9, 10, 11, 12, 13, 14, 15, 16, 17, 18, 19, 20, 21, 22, 23, 24, 25, 26, 27, 28, 29, 30, 31, 32, 33, 34, 35, 36, 37, 38, 39, 40, 41, 42, 43, 44, 45, 46, 47, 48, 49, 50, 51, 52, 53, 54, 55, 56, 57, 58, 59, 60, 61, 62, 63, 64

## FW-02-04-L-D-200-100
designator J?
CONN HDR 4POS 0.05 STACK T/H; Manufacturer: Samtec; Manufacturer Part Number: FW-02-04-L-D-200-100; Item Type: Connectors; Supplier: Digikey; Supplier Part Number: FW-02-04-L-D-200-100-ND; RoHS: Yes; Pricing: 1=1.2 (USD); ComponentLink1URL: https://datasheet.ciiva.com/10182/fw-th-10182008.pdf?src-supplier=Avnet; ComponentLink1Description: https://datasheet.ciiva.com/10182/fw-th-10182008.pdf?src-supplier=Avnet
footprint FW-02-04-L-D-200-100
pins: 1, 2, 3, 4

## FW-03-04-L-D-200-100
designator J?
CONN HDR 6POS 0.05 STACK T/H; Manufacturer: Samtec; Manufacturer Part Number: FW-03-04-L-D-200-100; Item Type: Connectors; Supplier: Digikey; Supplier Part Number: FW-03-04-L-D-200-100-ND; RoHS: Yes; Pricing: 1=1.73 (USD); ComponentLink1URL: http://suddendocs.samtec.com/catalog_english/fw_th.pdf?src-supplier=Digikey; ComponentLink1Description: http://suddendocs.samtec.com/catalog_english/fw_th.pdf?src-supplier=Digikey; ComponentLink2URL: http://www.samtec.com/documents/webfiles/pdf/FW_SM.PDF?src-supplier=Avnet; ComponentLink2Description: http://www.samtec.com/documents/webfiles/pdf/FW_SM.PDF?src-supplier=Avnet
footprint FW-03-04-L-D-200-100
pins: 1, 2, 3, 4, 5, 6

## GRPB031VWVN-RC
designator J?
CONN HEADER VERT 3POS 1.27MM; Manufacturer: Sullins; Manufacturer Part Number: GRPB031VWVN-RC; Item Type: Connectors; Number of Positions: 3; Supplier: Digikey; Supplier Part Number: S9014E-03-ND; RoHS: Yes; Stock: 29991; Pricing: 1=0.28, 10=0.238, 100=0.185, 500=0.15862, 1000=0.13218, 5000=0.1133, 10000=0.1079 (USD); Mounting Technology: Through Hole; Contact Material: Brass; Contact Shape: Square; Contact Finish - Mating: GOLD; Insulation Material: Nylon; Min Operating Temperature: -40°C; Max Operating Temperature: 105°C; Number of Rows: 1; Packaging: Bulk; Termination: Solder; Connector Type: Header; Contact Type: Male Pin; Fastening Type: Pull; Series: -; Pitch: 1.27mm; Lead Free: Lead Free; RoHS Compliant: Yes; Flammability Rating: UL94 V-0; ComponentLink1URL: https://datasheet.ciiva.com/726/71-grpb-1vwvn-rc-10957-c-726649.pdf?src-supplier=Digikey; ComponentLink1Description: https://datasheet.ciiva.com/726/71-grpb-1vwvn-rc-10957-c-726649.pdf?src-supplier=Digikey
footprint HDR 1x3 Straight (1.27mm)
pins: 1, 2, 3

## HC-0.8-6PLT
designator J?
1x6P 6P 1 Tin 0.8mm 6 -25℃~+85℃ Phosphor Bronze 500mA Standing paste SMD,P=0.8mm Wire To Board Connector ROHS; Manufacturer: HCTL; Manufacturer Part Number: HC-0.8-6PLT; Package: SMD,P=0.8mm; LCSC Part Number: C2845356; Item Type: Connector; ComponentLink1Description: LCSC; ComponentLink1URL: https://www.lcsc.com/product-detail/Wire-To-Board-Connector_HCTL-HC-0-8-6PLT_C2845356.html
footprint HC-0.8-6PLT
pins: 1, 2, 3, 4, 5, 6, MP1, MP2

## HTSW-103-07-G-D
designator J?
CONN HEADER VERT 6POS 2.54MM; Manufacturer: Samtec; Manufacturer Part Number: HTSW-103-07-G-D; Item Type: Male Header; Supplier: Avnet; Supplier Part Number: HTSW-103-07-G-D; RoHS: Yes; Category: Connectors; Stock: 450; Pricing: 1=0.98, 50=0.76, 100=0.62, 500=0.52, 1000=0.4 (USD); ComponentLink1URL: https://datasheet.ciiva.com/737/htsw-xxx-xx-xxx-x-xx-xx-xx-mkt-737887.pdf?src-supplier=Digikey; ComponentLink1Description: https://datasheet.ciiva.com/737/htsw-xxx-xx-xxx-x-xx-xx-xx-mkt-737887.pdf?src-supplier=Digikey
footprint HDR 2x3 Male Header
pins: 1, 2, 3, 4, 5, 6

## HX PZ2.54-3x6P ZZ
designator J?
Gold 1kV 3A Direct Insert Policy 2.5mm 260℃ 18P 3mm -40℃~+105℃ 6mm 2.54mm Triple row Brass 3x6P Plugin,P=2.54mm Pin Headers ROHS; Manufacturer: hanxia; Manufacturer Part Number: HX PZ2.54-3x6P ZZ; Package: Plugin,P=2.54mm; LCSC Part Number: C32713293; Item Type: Pin Header; ComponentLink1Description: LCSC; ComponentLink1URL: https://www.lcsc.com/product-detail/Pin-Headers_hanxia-HX-PZ2-54-3x6P-ZZ_C32713293.html
footprint HX PZ2.54-3x6P ZZ
pins: 1, 2, 3, 4, 5, 6, 7, 8, 9, 10, 11, 12, 13, 14, 15, 16, 17, 18

## KH-1.27PH90-1X4P-L10.5
designator J?
1A Right-Angle Square Pins 1mm 4P 4mm -40℃~+105℃ 1.27mm Plugin 1x4P Push-Pull,P=1.27mm Pin Headers ROHS; Manufacturer: Shenzhen Kinghelm Elec; Manufacturer Part Number: KH-1.27PH90-1X4P-L10.5; Item Type: Header; Supplier: LCSC; LCSC Part Number: C2938416; RoHS: No
footprint HDR1X4 (R/A Male) 1.27mm Pitch (Connector; Header; 4 Position)
pins: 1, 2, 3, 4

## N3314-5202RB
designator J?
3000 Series; 2.54mm Pitch 14 Way 2 Row Right Angle PCB Header; Solder Term; 2A; Manufacturer: 3M; Manufacturer Part Number: N3314-5202RB; Number of Contacts: 14; Gender: Male; Current Rating: 1A; Voltage Rating (AC): 350V; Voltage Rating: 1kV; Supplier: Digikey; Supplier Part Number: MHR14S-ND; RoHS: Yes; Category: Headers and Wire Housings; Stock: 7247; Pricing: 1=2.23, 10=2.026, 350=1.57111 (USD); Mounting Technology: Through Hole; Contact Plating: Gold; Contact Material: Copper Alloy,Copper; Color: Black; Housing Color: Black; Housing Material: Polyester; Contact Shape: Square; Contact Finish - Mating: GOLD; Insulation Material: Glass; Insulation Color: Black; Min Operating Temperature: -55°C; Max Operating Temperature: 105°C; Number of Rows: 2; Packaging: Bulk; Termination: Solder; Max Current Rating: 2A; Package Quantity: 100; Fastening Type: Latch; Number of Poles: 14; Number of Positions: 14; Working Voltage: 350V; Orientation: Right Angle; Connector Type: Header; Series: 3000; Contact Type: Male Pin; Length: 37.21mm; Pitch: 2.54mm; Lead Pitch: 2.54mm; Depth: 24.6mm; Reach SVHC Compliant: No; Lead Free: Lead Free; RoHS Compliant: Yes; Flammability Rating: UL94 V-0; ComponentLink1URL: https://datasheet.ciiva.com/15188/getdatasheetpartid-335427-15188603.pdf?src-supplier=Verical; ComponentLink1Description: https://datasheet.ciiva.com/15188/getdatasheetpartid-335427-15188603.pdf?src-supplier=Verical; ComponentLink2URL: https://datasheet.ciiva.com/11754/0900766b8077b7df-11754186.pdf?src-supplier=Rs; ComponentLink2Description: https://datasheet.ciiva.com/11754/0900766b8077b7df-11754186.pdf?src-supplier=Rs; ComponentLink3URL: https://datasheet.ciiva.com/719/ts0772-719288.pdf?src-supplier=Digikey; ComponentLink3Description: https://datasheet.ciiva.com/719/ts0772-719288.pdf?src-supplier=Digikey; ComponentLink4URL: https://datasheet.ciiva.com/8051/94653-8051014.pdf?src-supplier=Element14; ComponentLink4Description: https://datasheet.ciiva.com/8051/94653-8051014.pdf?src-supplier=Element14; Item Type: Header
footprint N3314-5202RB
pins: 1, 2, 3, 4, 5, 6, 7, 8, 9, 10, 11, 12, 13, 14

## N3314-5302RB
designator J?
CONN HEADER R/A 14POS 2.54MM; Manufacturer: 3M; Manufacturer Part Number: N3314-5302RB; Item Type: Headers; Supplier: Digikey; Supplier Part Number: MHR14N-ND; RoHS: Yes; Stock: 3469; Pricing: 1=3.17, 10=2.882, 350=2.22157, 700=2.1581, 1050=1.84073, 5250=1.65031 (USD); ComponentLink1URL: https://datasheet.ciiva.com/11747/0900766b8077b7df-11747268.pdf?src-supplier=Rs; ComponentLink1Description: https://datasheet.ciiva.com/11747/0900766b8077b7df-11747268.pdf?src-supplier=Rs; ComponentLink2URL: https://datasheet.ciiva.com/8051/94653-8051017.pdf?src-supplier=Element14; ComponentLink2Description: https://datasheet.ciiva.com/8051/94653-8051017.pdf?src-supplier=Element14; ComponentLink3URL: https://datasheet.ciiva.com/732/ts0772-732987.pdf?src-supplier=Digikey; ComponentLink3Description: https://datasheet.ciiva.com/732/ts0772-732987.pdf?src-supplier=Digikey; ComponentLink4URL: https://datasheet.ciiva.com/26829/getdatasheetpartid-311849-26829132.pdf?src-supplier=Verical; ComponentLink4Description: https://datasheet.ciiva.com/26829/getdatasheetpartid-311849-26829132.pdf?src-supplier=Verical
footprint N3314-5302RB
pins: 1, 2, 3, 4, 5, 6, 7, 8, 9, 10, 11, 12, 13, 14

## P125-1207A0BR138A1
designator J?
Gold Bend insert Policy 2.5mm 6mm 14P -40℃~+105℃ 2.54mm Brass Double Row Black 2x7P 2.54mm Push-Pull,P=2.54mm Pin Headers ROHS; Manufacturer: Yxcon; Manufacturer Part Number: P125-1207A0BR138A1; Package: Push-Pull,P=2.54mm; LCSC Part Number: C19190502; Item Type: Pin Header; ComponentLink1Description: LCSC; ComponentLink1URL: https://www.lcsc.com/product-detail/Pin-Headers_Yxcon-P125-1207A0BR138A1_C19190502.html
footprint P125-1207A0BR138A1
pins: 1, 2, 3, 4, 5, 6, 7, 8, 9, 10, 11, 12, 13, 14

## PH-01291
designator J?
3A Straight Square Pins 2.5mm 6P 6mm -40℃~+105℃ 3mm 2.54mm 双排 Black 2x3P 2.54mm Plugin,P=2.54mm Pin Headers ROHS; Manufacturer: Liansheng; Manufacturer Part Number: PH-01291; Item Type: Male Header; LCSC Part No: C2685197; ComponentLink1URL: https://www.lcsc.com/product-detail/Pin-Headers_Liansheng-PH-01291_C2685197.html; ComponentLink1Description: LCSC
footprint PH-01291
pins: 1, 2, 3, 4, 5, 6

## PH-01338
designator J?
3A Straight Square Pins 10P 3mm -40℃~+105℃ 3mm 2.54mm 双排 Black 2x5P 2.54mm Plugin,P=2.54mm Pin Headers ROHS; Manufacturer: Liansheng; Manufacturer Part Number: PH-01338; Package: Plugin,P=2.54mm; LCSC Part Number: C2685218; Item Type: Pin Header; ComponentLink1Description: LCSC; ComponentLink1URL: https://www.lcsc.com/product-detail/Pin-Headers_Liansheng-PH-01338_C2685218.html
footprint PH-01338
pins: 1, 2, 3, 4, 5, 6, 7, 8, 9, 10